# Altium schematic symbol library 2-2492104-2.SchLib: 1 symbol
Pins are listed as number, name and electrical type; pins without a type are passive.

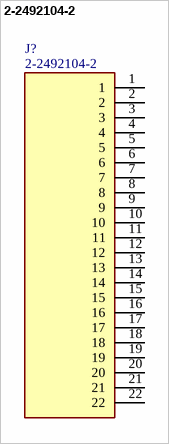
[diagram p0: symbol 2-2492104-2]

## 2-2492104-2
designator J?
.5 mm [.02 in] Centerline, Zero Insertion Force (ZIF), Right Angle, Surface Mount, Stuffer Actuator, Gold Flash, 36 Position, FPC Connectors; Manufacturer_Name: TE Connectivity; Manufacturer_Part_Number: 3-2492104-6; Geometry.Height: 2.25mm; Mouser Part Number: *; Mouser Price/Stock: *; Datasheet Link: https://www.te.com/commerce/DocumentDelivery/DDEController?Action=srchrtrv&DocNm=2492104&DocType=Customer%20Drawing&DocLang=English&DocFormat=pdf&PartCntxt=3-2492104-6
footprint 324921046
pins: 1, 2, 3, 4, 5, 6, 7, 8, 9, 10, 11, 12, 13, 14, 15, 16, 17, 18, 19, 20, 21, 22